# Altium footprint library MY_LIB_Connectors_GCT.PcbLib: 20 footprints (part 1 of 2)
Each footprint in its own frame and in the unit in brackets; x right, y up, seen from the top. Pads: shape width x height; smd on the part's side, far side on the other; paste and mask are expansions set on the pad; w line width, h text height; cw(c..) or ccw(c..) is an arc to the next point about the centre after c.
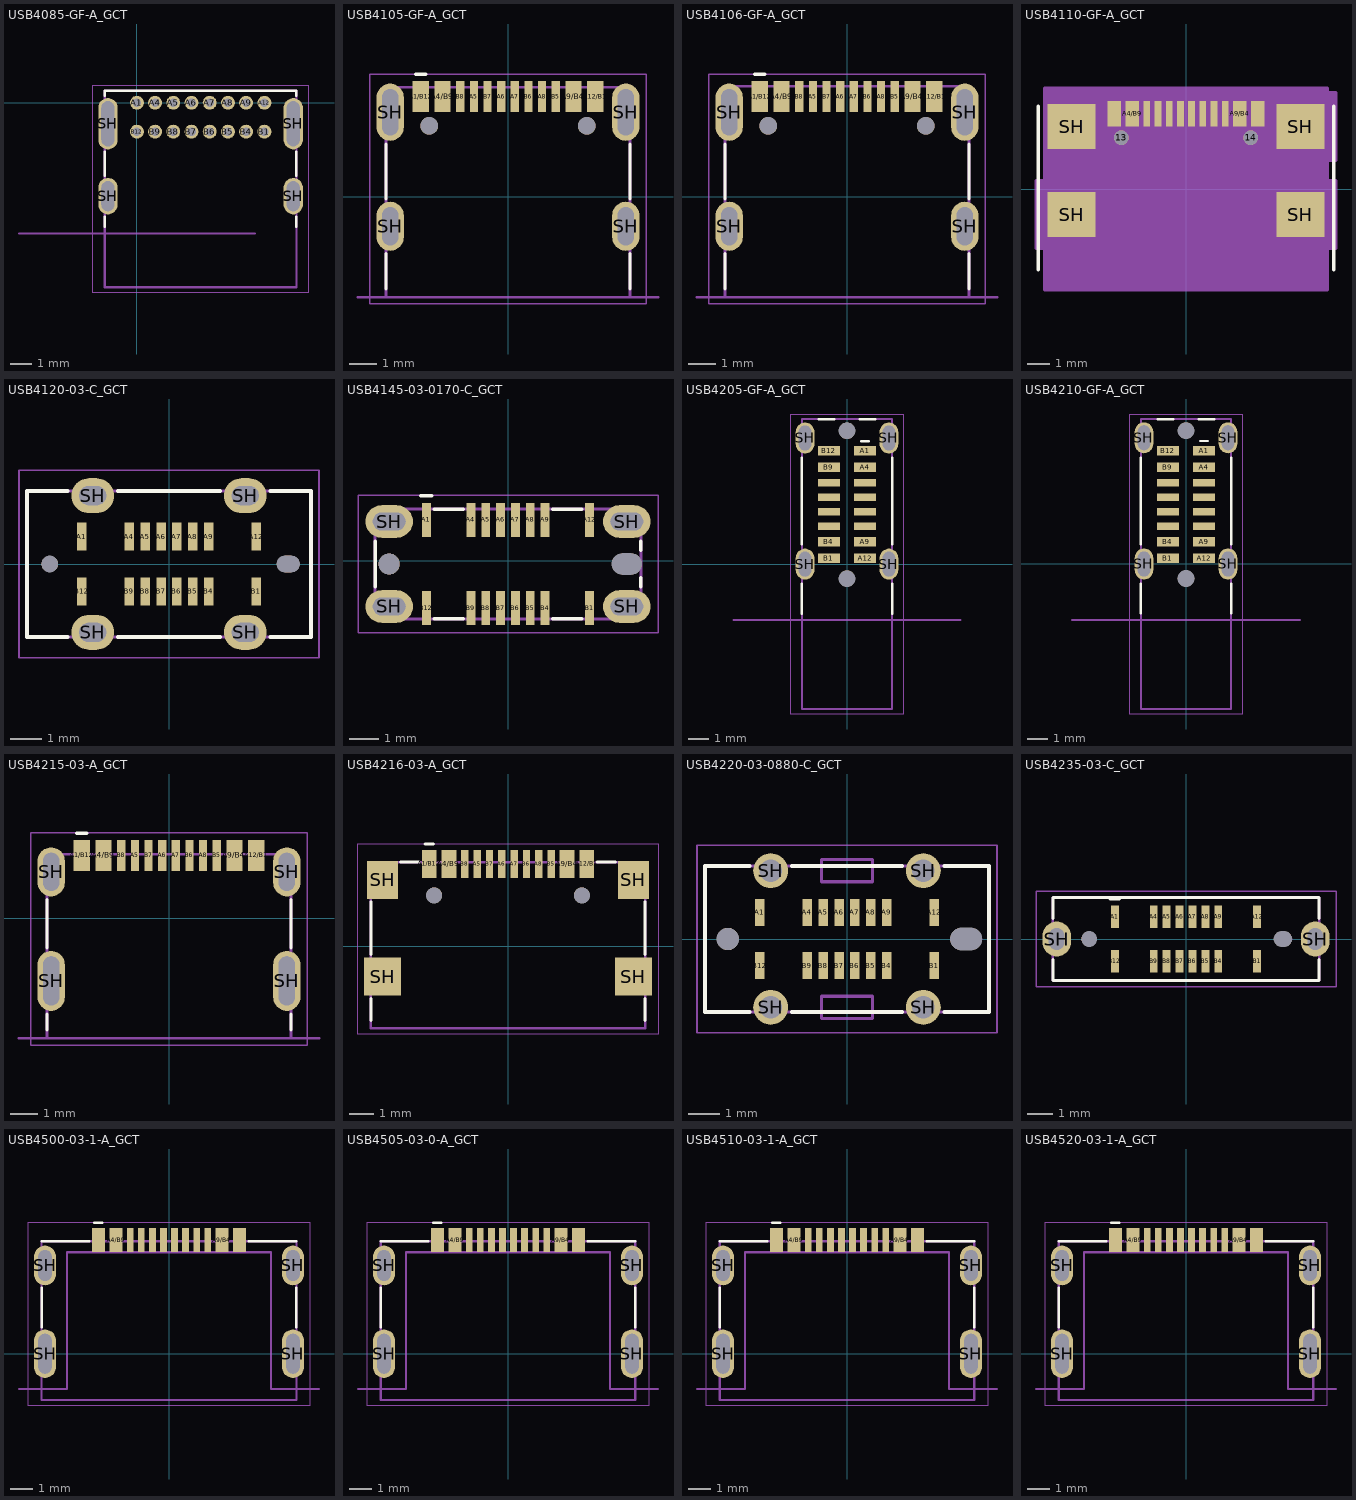
[diagram p0: the footprints below, top view; thin cyan lines are the x and y axes]

## USB4085-GF-A_GCT [mm] "GCT USB4085-GF-A; KiCad 9 official; embedded STEP"
height 3.46
pads (20):
  round 0.65 hole 0.4: A1(0,0) A4(0.85,0) A5(1.7,0) A6(2.55,0) A7(3.4,0) A8(4.25,0) A9(5.1,0) A12(5.95,0) B1(5.95,-1.35) B4(5.1,-1.35) B5(4.25,-1.35) B6(3.4,-1.35) B7(2.55,-1.35) B8(1.7,-1.35) B9(0.85,-1.35) B12(0,-1.35)
  oval 0.9x1.7 hole 0.6 slot 1.4 at 90 deg: SH(-1.35,-4.36) SH(7.3,-4.36)
  oval 0.9x2.4 hole 0.6 slot 2.1 at 90 deg: SH(-1.35,-0.98) SH(7.3,-0.98)
Top Overlay:
  lines w0.12: -1.495,-5.79 -1.495,-5.321 ; -1.495,-3.399 -1.495,-2.291 ; -1.495,0.331 -1.495,0.56 7.445,0.56 7.445,0.331 ; -0.18,0.565 0.18,0.565 ; 7.445,-5.79 7.445,-5.321 ; 7.445,-3.399 7.445,-2.291
Mechanical 1:
  lines w0.1: -1.495,-8.61 7.445,-8.61 7.445,0.56 -1.495,0.56 -1.495,-8.61
Mechanical 3:
  lines w0.1: -5.5,-6.1 5.5,-6.1
Mechanical 15:
  lines w0.05: -2.05,-8.86 8,-8.86 8,0.81 -2.05,0.81 -2.05,-8.86
3D body "USB4085-GF-A.step": height 3.46, standoff -2.1, extent -1.495,-8.61 7.445,0.56

## USB4105-GF-A_GCT [mm] "GCT USB4105-GF-A; KiCad 9 official; embedded STEP"
height 3.26
pads (18):
  rect 0.6x1.15 smd: A1/B12(-3.2,3.68) A4/B9(-2.4,3.68) A9/B4(2.4,3.68) A12/B1(3.2,3.68)
  rect 0.3x1.15 smd: A5(-1.25,3.68) A6(-0.25,3.68) A7(0.25,3.68) A8(1.25,3.68) B5(1.75,3.68) B6(0.75,3.68) B7(-0.75,3.68) B8(-1.75,3.68)
  oval 1x1.8 hole 0.6 slot 1.4 at 90 deg: SH(-4.32,-1.075) SH(4.32,-1.075)
  oval 1x2.1 hole 0.6 slot 1.7 at 90 deg: SH(-4.32,3.105) SH(4.32,3.105)
  round 0.65 hole 0.65 unplated: ""(-2.89,2.605) ""(2.89,2.605)
Top Overlay:
  lines w0.12: -4.47,-3.365 -4.47,-2.086 ; -4.47,-0.064 -4.47,1.944 ; -3.38,4.495 -3.02,4.495 ; 4.47,-3.365 4.47,-2.086 ; 4.47,-0.064 4.47,1.944
Mechanical 1:
  lines w0.1: -4.47,-3.675 4.47,-3.675 4.47,4.025 -4.47,4.025 -4.47,-3.675
Mechanical 3:
  lines w0.1: -5.5,-3.675 5.5,-3.675
Mechanical 15:
  lines w0.05: -5.07,-3.925 5.07,-3.925 5.07,4.505 -5.07,4.505 -5.07,-3.925
3D body "USB4105-GF-A.step": height 3.26, standoff -0.95, extent -4.47,-3.675 4.47,4.025

## USB4106-GF-A_GCT [mm] "GCT USB4106-GF-A; derived from USB4105-GF-A; embedded STEP"
height 3.26
pads (18):
  rect 0.6x1.15 smd: A1/B12(-3.2,3.68) A4/B9(-2.4,3.68) A9/B4(2.4,3.68) A12/B1(3.2,3.68)
  rect 0.3x1.15 smd: A5(-1.25,3.68) A6(-0.25,3.68) A7(0.25,3.68) A8(1.25,3.68) B5(1.75,3.68) B6(0.75,3.68) B7(-0.75,3.68) B8(-1.75,3.68)
  oval 1x1.8 hole 0.6 slot 1.4 at 90 deg: SH(-4.32,-1.075) SH(4.32,-1.075)
  oval 1x2.1 hole 0.6 slot 1.7 at 90 deg: SH(-4.32,3.105) SH(4.32,3.105)
  round 0.65 hole 0.65 unplated: ""(-2.89,2.605) ""(2.89,2.605)
Top Overlay:
  lines w0.12: -4.47,-3.365 -4.47,-2.086 ; -4.47,-0.064 -4.47,1.944 ; -3.38,4.495 -3.02,4.495 ; 4.47,-3.365 4.47,-2.086 ; 4.47,-0.064 4.47,1.944
Mechanical 1:
  lines w0.1: -4.47,-3.675 4.47,-3.675 4.47,4.054 -4.47,4.054 -4.47,-3.675
Mechanical 3:
  lines w0.1: -5.5,-3.675 5.5,-3.675
Mechanical 15:
  lines w0.05: -5.07,-3.925 5.07,-3.925 5.07,4.505 -5.07,4.505 -5.07,-3.925
3D body "USB4106-GF-A.step": height 3.26, standoff -0.9, extent -4.47,-3.675 4.47,4.054

## USB4110-GF-A_GCT [mil] "GCT USB4110-GF-A; corrected shell mask +0.05mm/paste 0mm; embedded community STEP"
height 128.35
pads (18):
  round 26 hole 26 unplated paste-99999 mask+0: 13(-113.78,90.07) 14(113.78,90.07)
  rect 24x45 smd paste+0 mask+0: A1/B12(-125.98,132.39) A4/B9(-94.49,132.39) A9/B4(94.49,132.39) A12/B1(125.98,132.39)
  rect 12x45 smd paste+0 mask+0: A5(-49.21,132.39) A6(-9.84,132.39) A7(9.84,132.39) A8(49.21,132.39) B5(68.9,132.39) B6(29.53,132.39) B7(-29.53,132.39) B8(-68.9,132.39)
  rect 85x79 smd paste+0 mask+1.97: SH(-201.18,-44.97) SH(-201.18,109.76) SH(201.18,-44.97) SH(201.18,109.76)
Top Overlay:
  lines w5.91: -259.84,-141.73 -259.84,145.67 ; 259.84,-141.73 259.84,145.67
Mechanical 13:
  lines w1: -228.5,-157 228.5,-157 228.5,157 -228.5,157 -228.5,-157
  text ".Designator" at -137.5,107.39 h50
  text "*" at -238.48,107.39 h50
Mechanical 15:
  region: -263.68,-104.47 -248.5,-104.47 -248.5,-177 248.5,-177 248.5,-104.47 263.68,-104.47 263.68,14.53 248.5,14.53 248.5,50.26 263.68,50.26 263.68,169.26 248.5,169.26 248.5,177 -248.5,177 -248.5,14.53 -263.68,14.53
  lines w6: -263.68,-104.47 -248.5,-104.47 -248.5,-177 248.5,-177 248.5,-104.47 263.68,-104.47 263.68,14.53 248.5,14.53 248.5,50.26 263.68,50.26 263.68,169.26 248.5,169.26 248.5,177 -248.5,177 -248.5,14.53 -263.68,14.53 -263.68,-104.47
3D body "USB4110-GF-A.step": height 128.35, standoff -24.61, extent -222.44,-157.29 222.44,145.86

## USB4120-03-C_GCT [mm] "GCT USB4120-03-C; EasyEDA/LCSC; embedded STEP"
height 6.5
pads (22):
  rect 0.3x0.87 smd: A1(-2.75,0.865) A4(-1.25,0.865) A5(-0.75,0.865) A6(-0.25,0.865) A7(0.25,0.865) A8(0.75,0.865) A9(1.25,0.865) A12(2.75,0.865) B1(2.75,-0.865) B4(1.25,-0.865) B5(0.75,-0.865) B6(0.25,-0.865) B7(-0.25,-0.865) B8(-0.75,-0.865) B9(-1.25,-0.865) B12(-2.75,-0.865)
  oval 1.35x1.1 hole 0.6 slot 0.85 at 0 deg: SH(-2.4,-2.15) SH(-2.4,2.15) SH(2.4,-2.15) SH(2.4,2.15)
  round 0.52 hole 0.52 unplated: ""(-3.75,0)
  oval 0.72x0.52 hole 0.52 slot 0.72 at 0 deg unplated: ""(3.75,0)
Top Overlay:
  lines w0.12: -3.186,-2.3 -4.47,-2.3 -4.47,2.3 -3.186,2.3 ; -1.614,-2.3 1.614,-2.3 ; -1.614,2.3 1.614,2.3 ; 3.186,-2.3 4.47,-2.3 4.47,2.3 3.186,2.3
Mechanical 1:
  lines w0.1: -4.47,-2.3 4.47,-2.3 4.47,2.3 -4.47,2.3 -4.47,-2.3
Mechanical 15:
  lines w0.05: -4.72,-2.95 4.72,-2.95 4.72,2.95 -4.72,2.95 -4.72,-2.95
3D body "USB4120-03-C.step": height 6.5, standoff -0.95, extent -4.47,-2.3 4.47,2.3

## USB4145-03-0170-C_GCT [mm] "GCT USB4145-03-0170-C; Antmicro (Apache-2.0); embedded STEP"
height 7.46
pads (22):
  rect 0.3x1.15 smd: A1(-2.75,1.375) A4(-1.25,1.375) A5(-0.75,1.375) A6(-0.25,1.375) A7(0.25,1.375) A8(0.75,1.375) A9(1.25,1.375) A12(2.75,1.375) B1(2.75,-1.595) B4(1.25,-1.595) B5(0.75,-1.595) B6(0.25,-1.595) B7(-0.25,-1.595) B8(-0.75,-1.595) B9(-1.25,-1.595) B12(-2.75,-1.595)
  oval 1.6x1.1 hole 0.6 slot 1.1 at 0 deg: SH(-4,-1.54) SH(-4,1.32) SH(4,-1.54) SH(4,1.32)
  round 0.71 hole 0.71 unplated: ""(-4,-0.11)
  oval 1.01x0.71 hole 0.71 slot 1.01 at 0 deg unplated: ""(4,-0.11)
Top Overlay:
  lines w0.12: -4.475,-0.879 -4.475,0.659 ; -2.93,2.19 -2.57,2.19 ; -2.489,-1.955 -1.511,-1.955 ; -2.489,1.735 -1.511,1.735 ; 1.511,-1.955 2.489,-1.955 ; 1.511,1.735 2.489,1.735 ; 4.47,-0.879 4.47,-0.576 ; 4.47,0.356 4.47,0.659
Mechanical 1:
  lines w0.1: -4.475,-1.955 4.47,-1.955 4.47,1.735 -4.475,1.735 -4.475,-1.955
Mechanical 15:
  lines w0.05: -5.05,-2.42 5.05,-2.42 5.05,2.2 -5.05,2.2 -5.05,-2.42
3D body "USB4145-03-0170-C.step": height 7.46, standoff -1.7, extent -4.475,-1.955 4.47,1.735

## USB4205-GF-A_GCT [mm] "GCT USB4205-GF-A; EasyEDA/LCSC C32342519; embedded STEP"
height 12.51
pads (22):
  rect 1.05x0.45 smd: A1(0.875,5.48) A4(0.875,4.68) A9(0.875,1.08) A12(0.875,0.28) B1(-0.875,0.28) B4(-0.875,1.08) B9(-0.875,4.68) B12(-0.875,5.48)
  rect 1.05x0.35 smd: A5(0.875,3.93) A6(0.875,3.23) A7(0.875,2.53) A8(0.875,1.83) B5(-0.875,1.83) B6(-0.875,2.53) B7(-0.875,3.23) B8(-0.875,3.93)
  oval 0.9x1.5 hole 0.6 slot 1.2 at 90 deg: SH(-2.03,0) SH(-2.03,6.1) SH(2.03,0) SH(2.03,6.1)
  round 0.8 hole 0.8 unplated: ""(0,-0.7) ""(0,6.45)
Top Overlay:
  lines w0.12: -2.18,-2.39 -2.18,-0.96 ; -2.18,0.96 -2.18,5.14 ; -1.37,7.01 -0.61,7.01 ; 0.61,7.01 1.37,7.01 ; 0.695,5.945 1.055,5.945 ; 2.18,-2.39 2.18,-0.96 ; 2.18,0.96 2.18,5.14
Mechanical 1:
  lines w0.1: -2.18,-7 2.18,-7 2.18,7.01 -2.18,7.01 -2.18,-7
Mechanical 3:
  lines w0.1: -5.5,-2.7 5.5,-2.7
Mechanical 15:
  lines w0.05: -2.73,-7.25 2.73,-7.25 2.73,7.26 -2.73,7.26 -2.73,-7.25
3D body "USB4205-GF-A.step": height 12.51, standoff -1.49, extent -2.18,-7 2.18,7.01

## USB4210-GF-A_GCT [mm] "GCT USB4210-GF-A; Antmicro (Apache-2.0); embedded STEP"
height 9.89
pads (22):
  rect 1.05x0.45 smd: A1(0.875,5.48) A4(0.875,4.68) A9(0.875,1.08) A12(0.875,0.28) B1(-0.875,0.28) B4(-0.875,1.08) B9(-0.875,4.68) B12(-0.875,5.48)
  rect 1.05x0.35 smd: A5(0.875,3.93) A6(0.875,3.23) A7(0.875,2.53) A8(0.875,1.83) B5(-0.875,1.83) B6(-0.875,2.53) B7(-0.875,3.23) B8(-0.875,3.93)
  oval 0.9x1.5 hole 0.6 slot 1.2 at 90 deg: SH(-2.03,0) SH(-2.03,6.1) SH(2.03,0) SH(2.03,6.1)
  round 0.8 hole 0.8 unplated: ""(0,-0.7) ""(0,6.45)
Top Overlay:
  lines w0.12: -2.18,-2.39 -2.18,-0.96 ; -2.18,0.96 -2.18,5.14 ; -1.37,7 -0.61,7 ; 0.61,7 1.37,7 ; 0.695,5.945 1.055,5.945 ; 2.18,-2.39 2.18,-0.96 ; 2.18,0.96 2.18,5.14
Mechanical 1:
  lines w0.1: -2.18,-7 2.18,-7 2.18,7 -2.18,7 -2.18,-7
Mechanical 3:
  lines w0.1: -5.5,-2.7 5.5,-2.7
Mechanical 15:
  lines w0.05: -2.73,-7.25 2.73,-7.25 2.73,7.25 -2.73,7.25 -2.73,-7.25
3D body "USB4210-GF-A.step": height 9.89, standoff -1.32, extent -2.18,-7 2.18,7

## USB4215-03-A_GCT [mm] "GCT USB4215-03-A; EasyEDA/LCSC; embedded STEP"
height 3.16
pads (16):
  rect 0.6x1.15 smd: A1/B12(-3.2,2.3) A4/B9(-2.4,2.3) A9/B4(2.4,2.3) A12/B1(3.2,2.3)
  rect 0.3x1.15 smd: A5(-1.25,2.3) A6(-0.25,2.3) A7(0.25,2.3) A8(1.25,2.3) B5(1.75,2.3) B6(0.75,2.3) B7(-0.75,2.3) B8(-1.75,2.3)
  oval 1x2.2 hole 0.6 slot 1.8 at 90 deg: SH(-4.32,-2.3) SH(4.32,-2.3)
  oval 1x1.8 hole 0.6 slot 1.4 at 90 deg: SH(-4.32,1.7) SH(4.32,1.7)
Top Overlay:
  lines w0.12: -4.47,-4.09 -4.47,-3.511 ; -4.47,-1.089 -4.47,0.689 ; -3.38,3.115 -3.02,3.115 ; 4.47,-4.09 4.47,-3.511 ; 4.47,-1.089 4.47,0.689
Mechanical 1:
  lines w0.1: -4.47,-4.4 4.47,-4.4 4.47,2.349 -4.47,2.349 -4.47,-4.4
Mechanical 3:
  lines w0.1: -5.5,-4.4 5.5,-4.4
Mechanical 15:
  lines w0.05: -5.07,-4.65 5.07,-4.65 5.07,3.125 -5.07,3.125 -5.07,-4.65
3D body "USB4215-03-A.step": height 3.16, standoff -0.9, extent -4.47,-4.4 4.47,2.349

## USB4216-03-A_GCT [mm] "GCT USB4216-03-A; open board cc1125; embedded STEP"
height 3.16
pads (18):
  rect 0.6x1.15 smd: A1/B12(-3.2,3.338) A4/B9(-2.4,3.338) A9/B4(2.4,3.338) A12/B1(3.2,3.338)
  rect 0.3x1.15 smd: A5(-1.25,3.338) A6(-0.25,3.338) A7(0.25,3.338) A8(1.25,3.338) B5(1.75,3.338) B6(0.75,3.338) B7(-0.75,3.338) B8(-1.75,3.338)
  rect 1.5x1.55 smd: SH(-5.095,-1.237) SH(5.095,-1.237)
  rect 1.25x1.55 smd: SH(-5.095,2.688) SH(5.095,2.688)
  round 0.65 hole 0.65 unplated: ""(-3,2.063) ""(3,2.063)
Top Overlay:
  lines w0.12: -5.57,-3.027 -5.57,-2.123 ; -5.57,-0.351 -5.57,1.802 ; -4.359,3.413 -3.611,3.413 ; -3.38,4.153 -3.02,4.153 ; 3.611,3.413 4.359,3.413 ; 5.57,-3.027 5.57,-2.123 ; 5.57,-0.351 5.57,1.802
Mechanical 1:
  lines w0.1: -5.57,-3.337 5.57,-3.337 5.57,3.413 -5.57,3.413 -5.57,-3.337
Mechanical 3:
  lines w0.1: -5.5,-3.337 5.5,-3.337
Mechanical 15:
  lines w0.05: -6.095,-3.587 6.095,-3.587 6.095,4.163 -6.095,4.163 -6.095,-3.587
3D body "USB4216-03-A.step": height 3.16, standoff -0.56, extent -5.57,-3.337 5.57,3.413

## USB4220-03-0880-C_GCT [mm] "GCT USB4220-03-0880-C; rebuilt from GCT drawing; embedded STEP"
height 8.8
pads (22):
  rect 0.3x0.85 smd: A1(-2.75,0.835) A4(-1.25,0.835) A5(-0.75,0.835) A6(-0.25,0.835) A7(0.25,0.835) A8(0.75,0.835) A9(1.25,0.835) A12(2.75,0.835) B1(2.75,-0.835) B4(1.25,-0.835) B5(0.75,-0.835) B6(0.25,-0.835) B7(-0.25,-0.835) B8(-0.75,-0.835) B9(-1.25,-0.835) B12(-2.75,-0.835)
  round 1.1 hole 0.7: SH(-2.4,-2.15) SH(-2.4,2.15) SH(2.4,-2.15) SH(2.4,2.15)
  round 0.7 hole 0.7 unplated: ""(-3.75,0)
  oval 1x0.7 hole 0.7 slot 1 at 0 deg unplated: ""(3.75,0)
Top Overlay:
  lines w0.12: -3.061,-2.3 -4.47,-2.3 -4.47,2.3 -3.061,2.3 ; -1.739,-2.3 1.739,-2.3 ; -1.739,2.3 1.739,2.3 ; 3.061,-2.3 4.47,-2.3 4.47,2.3 3.061,2.3
Mechanical 1:
  lines w0.1: -4.47,-2.3 4.47,-2.3 4.47,2.3 -4.47,2.3 -4.47,-2.3
Mechanical 3:
  lines w0.1: -0.8,-2.5 0.8,-2.5 0.8,-1.8 -0.8,-1.8 -0.8,-2.5 ; -0.8,1.8 0.8,1.8 0.8,2.5 -0.8,2.5 -0.8,1.8
Mechanical 15:
  lines w0.05: -4.72,-2.95 4.72,-2.95 4.72,2.95 -4.72,2.95 -4.72,-2.95
3D body "USB4220-03-0880-C.step": height 8.8, standoff -1.1, extent -4.47,-2.3 4.47,2.3

## USB4235-03-C_GCT [mm] "GCT USB4235-03-C; open board 8800; embedded STEP"
height 6.5
pads (20):
  rect 0.3x0.87 smd: A1(-2.75,0.865) A4(-1.25,0.865) A5(-0.75,0.865) A6(-0.25,0.865) A7(0.25,0.865) A8(0.75,0.865) A9(1.25,0.865) A12(2.75,0.865) B1(2.75,-0.865) B4(1.25,-0.865) B5(0.75,-0.865) B6(0.25,-0.865) B7(-0.25,-0.865) B8(-0.75,-0.865) B9(-1.25,-0.865) B12(-2.75,-0.865)
  oval 1.1x1.35 hole 0.6 slot 0.85 at 90 deg: SH(-5,0) SH(5,0)
  round 0.6 hole 0.6 unplated: ""(-3.75,0)
  oval 0.7x0.6 hole 0.6 slot 0.7 at 0 deg unplated: ""(3.75,0)
Top Overlay:
  lines w0.12: -5.15,-0.786 -5.15,-1.6 5.15,-1.6 5.15,-0.786 ; -5.15,0.786 -5.15,1.6 5.15,1.6 5.15,0.786 ; -2.93,1.54 -2.57,1.54
Mechanical 1:
  lines w0.1: -5.15,-1.6 5.15,-1.6 5.15,1.6 -5.15,1.6 -5.15,-1.6
Mechanical 15:
  lines w0.05: -5.8,-1.85 5.8,-1.85 5.8,1.85 -5.8,1.85 -5.8,-1.85
3D body "USB4235-03-C.step": height 6.5, standoff -0.95, extent -5.15,-1.6 5.15,1.6

## USB4500-03-1-A_GCT [mm] "GCT USB4500-03-1-A; EasyEDA/LCSC; embedded STEP"
height 2.364
pads (16):
  rect 0.6x1.1 smd: A1/B12(-3.2,5.15) A4/B9(-2.4,5.15) A9/B4(2.4,5.15) A12/B1(3.2,5.15)
  rect 0.3x1.1 smd: A5(-1.25,5.15) A6(-0.25,5.15) A7(0.25,5.15) A8(1.25,5.15) B5(1.75,5.15) B6(0.75,5.15) B7(-0.75,5.15) B8(-1.75,5.15)
  oval 1x2.2 hole 0.6 slot 1.8 at 90 deg: SH(-5.62,0) SH(5.62,0)
  oval 1x1.8 hole 0.6 slot 1.4 at 90 deg: SH(-5.62,4) SH(5.62,4)
Top Overlay:
  lines w0.12: -5.775,1.211 -5.775,2.989 ; -5.775,5.102 -3.611,5.102 ; -3.38,5.94 -3.02,5.94 ; 3.611,5.102 5.775,5.102 ; 5.775,1.211 5.775,2.989
Mechanical 1:
  lines w0.1: -5.775,-2.1 5.775,-2.1 5.775,5.102 -5.775,5.102 -5.775,-2.1
Mechanical 3:
  lines w0.1: -6.8,-1.6 -4.62,-1.6 -4.62,4.6 4.62,4.6 4.62,-1.6 6.8,-1.6
Mechanical 15:
  lines w0.05: -6.37,-2.35 6.37,-2.35 6.37,5.95 -6.37,5.95 -6.37,-2.35
3D body "USB4500-03-1-A.step": height 2.36, standoff -0.8, extent -5.775,-2.1 5.775,5.102

## USB4505-03-0-A_GCT [mm] "GCT USB4505-03-0-A; marbastlib (CERN-OHL-P-2.0); embedded STEP"
height 2.159
pads (16):
  rect 0.6x1.1 smd: A1/B12(-3.2,5.15) A4/B9(-2.4,5.15) A9/B4(2.4,5.15) A12/B1(3.2,5.15)
  rect 0.3x1.1 smd: A5(-1.25,5.15) A6(-0.25,5.15) A7(0.25,5.15) A8(1.25,5.15) B5(1.75,5.15) B6(0.75,5.15) B7(-0.75,5.15) B8(-1.75,5.15)
  oval 1x2.2 hole 0.6 slot 1.8 at 90 deg: SH(-5.62,0) SH(5.62,0)
  oval 1x1.8 hole 0.6 slot 1.4 at 90 deg: SH(-5.62,4) SH(5.62,4)
Top Overlay:
  lines w0.12: -5.77,1.211 -5.77,2.989 ; -5.77,5.102 -3.611,5.102 ; -3.38,5.94 -3.02,5.94 ; 3.611,5.102 5.77,5.102 ; 5.77,1.211 5.77,2.989
Mechanical 1:
  lines w0.1: -5.77,-2.1 5.77,-2.1 5.77,5.102 -5.77,5.102 -5.77,-2.1
Mechanical 3:
  lines w0.1: -6.8,-1.6 -4.62,-1.6 -4.62,4.6 4.62,4.6 4.62,-1.6 6.8,-1.6
Mechanical 15:
  lines w0.05: -6.37,-2.35 6.37,-2.35 6.37,5.95 -6.37,5.95 -6.37,-2.35
3D body "USB4505-03-0-A.step": height 2.16, standoff -1, extent -5.77,-2.1 5.77,5.102

## USB4510-03-1-A_GCT [mm] "GCT USB4510-03-1-A; marbastlib (CERN-OHL-P-2.0); embedded STEP"
height 1.555
pads (16):
  rect 0.6x1.1 smd: A1/B12(-3.2,5.15) A4/B9(-2.4,5.15) A9/B4(2.4,5.15) A12/B1(3.2,5.15)
  rect 0.3x1.1 smd: A5(-1.25,5.15) A6(-0.25,5.15) A7(0.25,5.15) A8(1.25,5.15) B5(1.75,5.15) B6(0.75,5.15) B7(-0.75,5.15) B8(-1.75,5.15)
  oval 1x2.2 hole 0.6 slot 1.8 at 90 deg: SH(-5.62,0) SH(5.62,0)
  oval 1x1.8 hole 0.6 slot 1.4 at 90 deg: SH(-5.62,4) SH(5.62,4)
Top Overlay:
  lines w0.12: -5.77,1.211 -5.77,2.989 ; -5.77,5.1 -3.611,5.1 ; -3.38,5.94 -3.02,5.94 ; 3.611,5.1 5.77,5.1 ; 5.77,1.211 5.77,2.989
Mechanical 1:
  lines w0.1: -5.77,-2.1 5.77,-2.1 5.77,5.1 -5.77,5.1 -5.77,-2.1
Mechanical 3:
  lines w0.1: -6.8,-1.6 -4.62,-1.6 -4.62,4.6 4.62,4.6 4.62,-1.6 6.8,-1.6
Mechanical 15:
  lines w0.05: -6.37,-2.35 6.37,-2.35 6.37,5.95 -6.37,5.95 -6.37,-2.35
3D body "USB4510-03-1-A.step": height 1.56, standoff -1.63, extent -5.77,-2.1 5.77,5.1

## USB4520-03-1-A_GCT [mm] "GCT USB4520-03-1-A; derived from USB4505-03-0-A; embedded STEP"
height 1.072
pads (16):
  rect 0.6x1.1 smd: A1/B12(-3.2,5.15) A4/B9(-2.4,5.15) A9/B4(2.4,5.15) A12/B1(3.2,5.15)
  rect 0.3x1.1 smd: A5(-1.25,5.15) A6(-0.25,5.15) A7(0.25,5.15) A8(1.25,5.15) B5(1.75,5.15) B6(0.75,5.15) B7(-0.75,5.15) B8(-1.75,5.15)
  oval 1x2.2 hole 0.6 slot 1.8 at 90 deg: SH(-5.62,0) SH(5.62,0)
  oval 1x1.8 hole 0.6 slot 1.4 at 90 deg: SH(-5.62,4) SH(5.62,4)
Top Overlay:
  lines w0.12: -5.77,1.211 -5.77,2.989 ; -5.77,5.099 -3.611,5.099 ; -3.38,5.94 -3.02,5.94 ; 3.611,5.099 5.77,5.099 ; 5.77,1.211 5.77,2.989
Mechanical 1:
  lines w0.1: -5.77,-2.1 5.77,-2.1 5.77,5.099 -5.77,5.099 -5.77,-2.1
Mechanical 3:
  lines w0.1: -6.8,-1.6 -4.62,-1.6 -4.62,4.6 4.62,4.6 4.62,-1.6 6.8,-1.6
Mechanical 15:
  lines w0.05: -6.37,-2.35 6.37,-2.35 6.37,5.95 -6.37,5.95 -6.37,-2.35
3D body "USB4520-03-1-A.step": height 1.07, standoff -2.1, extent -5.77,-2.1 5.77,5.099